# Altium footprint library 7seg.PcbLib: 32 footprints (part 2 of 2)
Each footprint in its own frame and in the unit in brackets; x right, y up, seen from the top. Pads: shape width x height; smd on the part's side, far side on the other; paste and mask are expansions set on the pad; w line width, h text height; cw(c..) or ccw(c..) is an arc to the next point about the centre after c.
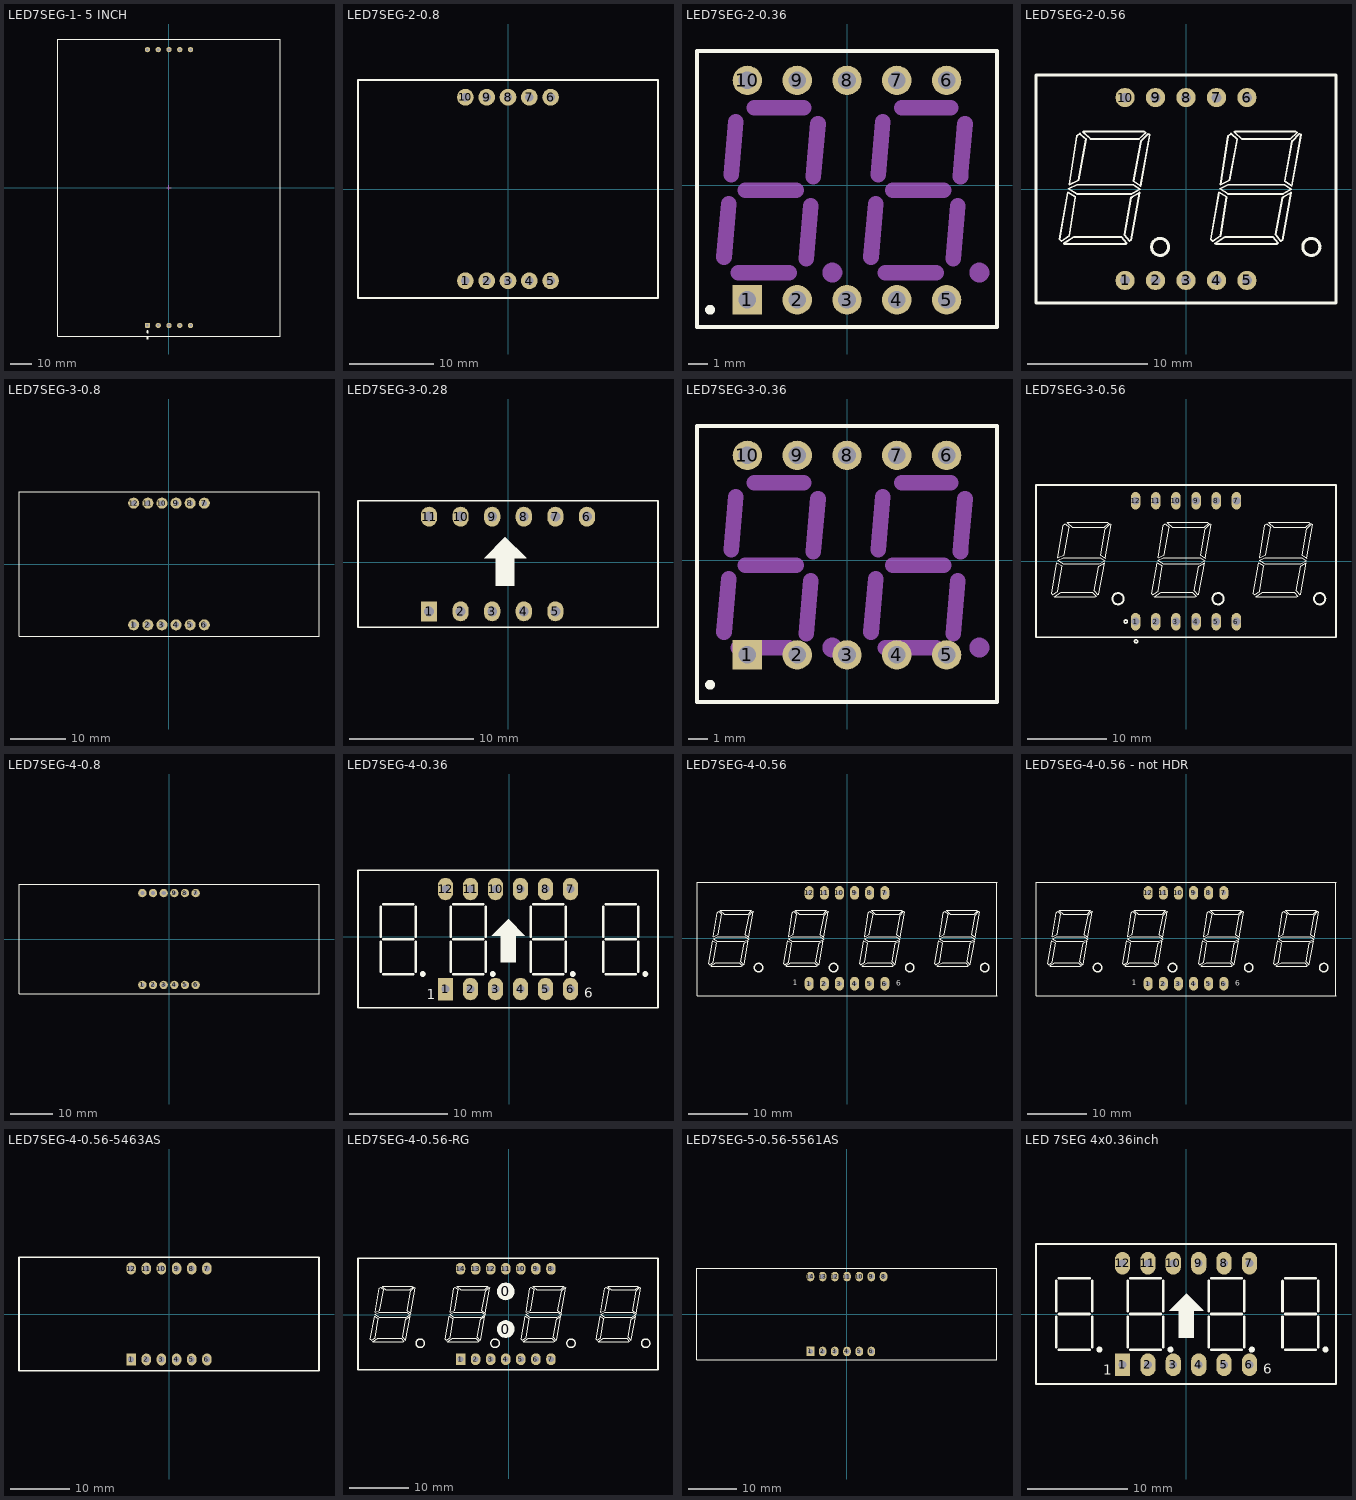
[diagram p1: the footprints below, top view; thin cyan lines are the x and y axes]

## LED7SEG-1- 5 INCH [mm]
pads (10):
  rrect50% 2.5x2.5 hole 1.2: 1(-10.16,-65)
  round 2.5 hole 1.2: 2(-5.08,-65) 3(0,-65) 4(5.08,-65) 5(10.16,-65) 6(10.16,65) 7(5.08,65) 8(0,65) 9(-5.08,65) 10(-10.16,65)
Top Overlay:
  circle w0.2: c-10.1,-68 r0.4
  circle w0.2: c-10.1,-71 r0.4
  lines w0.2: -52.5,-70 52.5,-70 52.5,70 -52.5,70 -52.5,-70
Top Designator:
  text ".Designator" at -3.71,-1.044 h1.52
Mechanical 15:
  lines w0.15: -1,0 1,0 ; 0,-1 0,1
3D body "User Library-7-Segment-5_0inch-50101A-B.STEP": height 16.01, standoff -6.99, extent -52.5,-70 52.5,70

## LED7SEG-2-0.8 [mm]
pads (10):
  round 2 hole 1: 1(-5.08,-10.95) 2(-2.54,-10.95) 3(0,-10.95) 4(2.54,-10.95) 5(5.08,-10.95) 6(5.08,10.95) 7(2.54,10.95) 8(0,10.95) 9(-2.54,10.95) 10(-5.08,10.95)
Top Overlay:
  lines w0.2: -17.9,-13 17.9,-13 17.9,13 -17.9,13 -17.9,-13
3D body "2LED.STEP": height 9, standoff -6.3, extent -17.9,-12.9 17.9,12.9

## LED7SEG-2-0.36 [mm] "LED, 7-Segment Display, 9.2 mm, Dual Digit; 10 Leads; Row Space 10.7 mm; Pitch 2.54 mm"
height 7.35
pads (10):
  rect 1.5x1.5 hole 0.9: 1(-5.08,-5.842)
  round 1.5 hole 0.9: 2(-2.54,-5.842) 3(0,-5.842) 4(2.54,-5.842) 5(5.08,-5.842) 6(5.08,5.35) 7(2.54,5.35) 8(0,5.35) 9(-2.54,5.35) 10(-5.08,5.35)
Top Overlay:
  circle w0.25: c-6.985,-6.35 r0.125
  lines w0.2: -7.65,-7.239 -7.65,-0.635 -7.65,6.858 7.65,6.858 7.65,-7.239 -7.65,-7.239
Mechanical 1:
  circle w0.75: c-0.747,-4.454 r0.13
  circle w0.75: c6.753,-4.454 r0.13
  lines w0.8: -6.275,-3.656 -6.038,-0.949 ; -5.909,0.547 -5.671,3.242 ; -5.541,-4.454 -2.949,-4.454 ; -5.172,-0.254 -2.582,-0.254 ; -4.714,3.946 -2.213,3.946 ; -2.084,-3.75 -1.847,-1.056 ; -1.715,0.448 -1.48,3.145 ; 1.225,-3.656 1.462,-0.949 ; 1.591,0.547 1.829,3.242 ; 1.959,-4.454 4.551,-4.454 ; 2.328,-0.254 4.918,-0.254 ; 2.786,3.946 5.287,3.946 ; 5.416,-3.75 5.653,-1.056 ; 5.785,0.448 6.02,3.145
Top Designator:
  text ".Designator" at -3.71,-0.534 h1.52
3D body "61300511821.stp": height 8.51, standoff -3.09, extent -6.6,4.1 6.6,6.6
3D body "7 Segment Double Digit LED Display.STEP": height 12.02, standoff 1, extent -7.5,-7.264 7.5,6.746
3D body "61300511821.stp": height 8.51, standoff -3.09, extent -6.6,-7.072 6.6,-4.572

## LED7SEG-2-0.56 [mm]
height 0.8
pads (10):
  round 1.6 hole 0.8: 1(-5.08,-7.62) 2(-2.54,-7.62) 3(0,-7.62) 4(2.54,-7.62) 5(5.08,-7.62) 6(5.08,7.62) 7(2.54,7.62) 8(0,7.62) 9(-2.54,7.62) 10(-5.08,7.62)
Top Overlay:
  circle w0.254: c-2.162,-4.826 r0.712
  circle w0.254: c10.443,-4.826 r0.712
  lines w0.152: -9.985,-4.597 -9.452,-4.597 ; -9.376,-4.597 -10.062,-4.597 -10.112,-4.597 ; -8.309,4.801 -3.839,4.801 -3.508,4.801 -3.356,4.699 -3.915,4.166 -4.448,4.166 ; -8.258,4.801 -8.512,4.801 -8.588,4.75 -8.563,4.725 -7.953,4.166 -4.397,4.166 ; 2.619,-4.597 3.153,-4.597 ; 3.229,-4.597 2.543,-4.597 2.492,-4.597 ; 4.296,4.801 8.766,4.801 9.096,4.801 9.249,4.699 8.69,4.166 8.157,4.166 ; 4.347,4.801 4.093,4.801 4.016,4.75 4.042,4.725 4.651,4.166 8.207,4.166 ; -10.366,-4.343 -9.731,-3.911 ; -10.366,-4.343 -10.544,-4.191 -9.858,-0.279 -9.223,-0.66 -9.731,-3.911 ; -10.366,-4.343 -9.731,-3.911 ; -10.112,-4.597 -8.842,-4.597 -5.032,-4.597 -4.931,-4.521 -5.388,-3.987 -9.325,-3.987 -10.189,-4.546 -10.112,-4.597 ; 2.238,-4.343 2.873,-3.911 ; 2.238,-4.343 2.061,-4.191 2.746,-0.279 3.381,-0.66 2.873,-3.911 ; 2.238,-4.343 2.873,-3.911 ; 2.492,-4.597 3.762,-4.597 7.572,-4.597 7.674,-4.521 7.217,-3.987 3.28,-3.987 2.416,-4.546 2.492,-4.597 ; -9.782,0.026 -9.096,0.356 -4.397,0.356 -3.839,-0.025 -4.524,-0.406 -9.096,-0.406 -9.782,0.026 ; -9.731,0.356 -8.969,0.737 -8.334,4.166 -8.842,4.623 -9.096,4.42 -9.731,0.356 ; -5.134,-3.81 -4.575,-0.711 -4.474,-0.66 -3.864,-0.304 -4.575,-4.267 -4.702,-4.343 -5.134,-3.81 ; -4.372,0.661 -3.762,3.988 -3.153,4.598 -3.026,4.547 -3.788,0.254 -4.372,0.661 ; 2.823,0.026 3.508,0.356 8.207,0.356 8.766,-0.025 8.08,-0.406 3.508,-0.406 2.823,0.026 ; 2.873,0.356 3.635,0.737 4.27,4.166 3.762,4.623 3.508,4.42 2.873,0.356 ; 7.471,-3.81 8.03,-0.711 8.131,-0.66 8.741,-0.304 8.03,-4.267 7.903,-4.343 7.471,-3.81 ; 8.233,0.661 8.842,3.988 9.452,4.598 9.579,4.547 8.817,0.254 8.233,0.661
  lines w0.254: -12.5,-9.5 -12.5,9.5 12.5,9.5 12.5,-9.5 -12.5,-9.5
Top Designator:
  text ".Designator" at -7.307,-0.677 h3
3D body "7SEG_2digit_1925.step": height 8.1, standoff -2.9, extent -12.5,-9.5 12.5,9.5

## LED7SEG-3-0.8 [mm]
pads (12):
  round 2 hole 1: 1(-6.35,-10.95) 2(-3.81,-10.95) 3(-1.27,-10.95) 4(1.27,-10.95) 5(3.81,-10.95) 6(6.35,-10.95) 7(6.35,10.95) 8(3.81,10.95) 9(1.27,10.95) 10(-1.27,10.95) 11(-3.81,10.95) 12(-6.35,10.95)
Top Overlay:
  lines w0.2: -27,-13 -27,13 27,13 27,-13 -27,-13
3D body "3LED.STEP": height 9, standoff -6.3, extent -27,-12.9 27,12.9

## LED7SEG-3-0.28 [mil]
height 300
pads (11):
  rect 51.18x62.99 hole 31: 1(-250,-155)
  oval 51.18x62.99 hole 31: 2(-150,-155) 3(-50,-155) 4(50,-155) 5(150,-155) 6(250,145) 7(150,145) 8(50,145) 9(-50,145) 10(-150,145) 11(-250,145)
Top Overlay:
  region: -76,14 -10,80 -8,80 57,15 57,14 20,14 20,-74 -39,-74 -39,14
  lines w5: -475,-205 475,-205 475,195 -475,195 -475,-205
Top Designator:
  text ".Designator" at -146.08,-18.54 h60
3D body "61300611821.stp": height 335.04, standoff -121.65, extent -309.84,95.79 309.85,194.22
3D body "61300511821.stp": height 335.04, standoff -121.65, extent -309.85,-205 209.84,-106.58
3D body "User Library-IND GNT-2831BD.step": height -157.48, standoff -524.02, extent -472.44,-202.25 472.44,191.85

## LED7SEG-3-0.36 [mm]
height 7.35
pads (10):
  rect 1.5x1.5 hole 0.9: 1(-5.08,-4.826)
  round 1.5 hole 0.9: 2(-2.54,-4.826) 3(0,-4.826) 4(2.54,-4.826) 5(5.08,-4.826) 6(5.08,5.35) 7(2.54,5.35) 8(0,5.35) 9(-2.54,5.35) 10(-5.08,5.35)
Top Overlay:
  circle w0.25: c-6.985,-6.35 r0.125
  lines w0.2: -7.65,-7.239 -7.65,-0.635 -7.65,6.858 7.65,6.858 7.65,-7.239 -7.65,-7.239
Mechanical 1:
  circle w0.75: c-0.747,-4.454 r0.13
  circle w0.75: c6.753,-4.454 r0.13
  lines w0.8: -6.275,-3.656 -6.038,-0.949 ; -5.909,0.547 -5.671,3.242 ; -5.541,-4.454 -2.949,-4.454 ; -5.172,-0.254 -2.582,-0.254 ; -4.714,3.946 -2.213,3.946 ; -2.084,-3.75 -1.847,-1.056 ; -1.715,0.448 -1.48,3.145 ; 1.225,-3.656 1.462,-0.949 ; 1.591,0.547 1.829,3.242 ; 1.959,-4.454 4.551,-4.454 ; 2.328,-0.254 4.918,-0.254 ; 2.786,3.946 5.287,3.946 ; 5.416,-3.75 5.653,-1.056 ; 5.785,0.448 6.02,3.145
Top Designator:
  text ".Designator" at -2.44,-0.386 h1.52
3D body "61300511821.stp": height 8.51, standoff -3.09, extent -6.6,4.1 6.6,6.6
3D body "61300511821.stp": height 8.51, standoff -3.09, extent -6.6,-6.076 6.6,-3.576
3D body "SD-3361_X.SLDPRT": height 12, standoff -1.3, extent -9.98,-6.746 12.52,7.254

## LED7SEG-3-0.56 [mm] "7SEG 3DIGIT 0.56"
height 7.62
pads (12):
  oval 1.2x2.2 hole 1: 1(-6.35,-7.62) 2(-3.81,-7.62) 3(-1.27,-7.62) 4(1.27,-7.62) 5(3.81,-7.62) 6(6.35,-7.62) 7(6.35,7.62) 8(3.81,7.62) 9(1.27,7.62) 10(-1.27,7.62) 11(-3.81,7.62) 12(-6.35,7.62)
Top Overlay:
  drawing of 153 lines, arcs and shapes, not listed
Top Designator:
  text ".Designator" at -7.2,-0.634 h3
3D body "end-el-san Co Ltd-King Bright BX56-12A.step": height 8.2, standoff -3.9, extent -18.8,-9.5 18.8,9.5

## LED7SEG-4-0.8 [mm]
pads (12):
  round 2 hole 1: 1(-6.35,-10.95) 2(-3.81,-10.95) 3(-1.27,-10.95) 4(1.27,-10.95) 5(3.81,-10.95) 6(6.35,-10.95) 7(6.35,10.95) 8(3.81,10.95) 9(1.27,10.95) 10(-1.27,10.95) 11(-3.81,10.95) 12(-6.35,10.95)
Top Overlay:
  lines w0.2: -35.75,-13 35.75,-13 35.75,13 -35.75,13 -35.75,-13
3D body "4LED.STEP": height 9, standoff -6.3, extent -35.75,-13 35.75,13

## LED7SEG-4-0.36 [mil]
height 300
pads (12):
  rect 60x90 hole 31: 1(-255,-210)
  oval 60x90 hole 31: 2(-155,-210) 3(-55,-210) 4(45,-210) 5(145,-210) 6(245,-210) 7(245,190) 8(145,190) 9(45,190) 10(-55,190) 11(-155,190) 12(-255,190)
Top Overlay:
  circle w12: c254,-150 r6
  circle w12: c544,-150 r6
  circle w12: c-346,-150 r6
  circle w12: c-66,-150 r6
  region: -71,3 -5,69 -3,69 62,4 62,3 25,3 25,-103 -34,-103 -34,3
  lines w7: -605,-285 -605,265 595,265 595,-285 -605,-285
  lines w10: -515,-140 -515,-20 ; -515,0 -515,120 ; -505,-150 -385,-150 ; -505,130 -385,130 ; -375,-140 -375,-20 ; -375,0 -375,120 ; -235,-140 -235,-20 ; -235,0 -235,120 ; -225,-150 -105,-150 ; -225,130 -105,130 ; -95,-140 -95,-20 ; -95,0 -95,120 ; 85,-140 85,-20 ; 85,0 85,120 ; 95,-150 215,-150 ; 95,130 215,130 ; 225,-140 225,-20 ; 225,0 225,120 ; 375,-140 375,-20 ; 375,0 375,120 ; 385,-150 505,-150 ; 385,130 505,130 ; 515,-140 515,-20 ; 515,0 515,120 ; -505,-10 -385,-10 -505,-10 ; -225,-10 -105,-10 -225,-10 ; 95,-10 215,-10 95,-10 ; 385,-10 505,-10 385,-10
  text "1" at -330,-250 h39.37
  text "6" at 300,-245 h39.37
Top Designator:
  text ".Designator" at -151.08,-24.88 h60
3D body "SOCKET6.stp": height 276.19, standoff -117.33, extent -305,-260 295,-160
3D body "SOCKET6.stp": height 276.19, standoff -117.33, extent -305,140 295,240
3D body "User Library-7-seg-4_asm.STEP": height 7.87, standoff -511.81, extent -595.55,-291.18 585.55,260

## LED7SEG-4-0.56 [mil]
height 300
pads (12):
  oval 60x90 hole 31: 1(-250,-300) 2(-150,-300) 3(-50,-300) 4(50,-300) 5(150,-300) 6(250,-300) 7(250,300) 8(150,300) 9(50,300) 10(-50,300) 11(-150,300) 12(-250,300)
Top Overlay:
  drawing of 200 lines, arcs and shapes, not listed
  text "6" at 325,-326 h60
  text "1" at -358,-324 h60
Top Designator:
  text ".Designator" at -146.08,-18.54 h60
3D body "SOCKET6.stp": height 276.19, standoff -117.33, extent -300,250 300,350
3D body "SOCKET6.stp": height 276.19, standoff -117.33, extent -300,-345 300,-245
3D body "7seg2-4.STEP": height 315.46, standoff -137.3, extent -990.16,-379.02 990.16,369.02

## LED7SEG-4-0.56 - not HDR [mil]
height 300
pads (12):
  oval 60x90 hole 31: 1(-250,-300) 2(-150,-300) 3(-50,-300) 4(50,-300) 5(150,-300) 6(250,-300) 7(250,300) 8(150,300) 9(50,300) 10(-50,300) 11(-150,300) 12(-250,300)
Top Overlay:
  drawing of 200 lines, arcs and shapes, not listed
  text "1" at -358,-324 h60
  text "6" at 325,-326 h60
Top Designator:
  text ".Designator" at -146.08,-18.54 h60
3D body "7seg2-4.STEP": height 315.46, standoff -137.3, extent -990.16,-379.02 990.16,369.02

## LED7SEG-4-0.56-5463AS [mm] "5463AS"
pads (12):
  rect 1.6x2 hole 1: 1(-6.35,-7.62)
  oval 1.6x2 hole 1: 2(-3.81,-7.62) 3(-1.27,-7.62) 4(1.27,-7.62) 5(3.81,-7.62) 6(6.35,-7.62) 7(6.35,7.62) 8(3.81,7.62) 9(1.27,7.62) 10(-1.27,7.62) 11(-3.81,7.62) 12(-6.35,7.62)
Top Overlay:
  lines w0.254: -25.15,-9.5 -25.15,9.5 25.15,9.5 25.15,-9.5 -25.15,-9.5
Top Designator:
  text ".Designator" at -3.837,-0.217 h1.52
3D body "7seg Quad 5643BS.step": height 8, standoff -3, extent -25,-9.5 25,9.5

## LED7SEG-4-0.56-RG [mm]
pads (16):
  round 3 on Top Overlay: 0(-0.508,-2.413) 0(-0.508,3.937)
  rect 1.6x2 hole 1: 1(-8.128,-7.493)
  oval 1.6x2 hole 1: 2(-5.588,-7.493) 3(-3.048,-7.493) 4(-0.508,-7.493) 5(2.032,-7.493) 6(4.572,-7.493) 7(7.112,-7.493) 8(7.112,7.747) 9(4.572,7.747) 10(2.032,7.747) 11(-0.508,7.747) 12(-3.048,7.747) 13(-5.588,7.747) 14(-8.128,7.747)
Top Overlay:
  drawing of 200 lines, arcs and shapes, not listed
Top Designator:
  text ".Designator" at -3.837,-0.217 h1.52
3D body "SOCKET6.stp": height 7.02, standoff -2.98, extent -8.255,-8.509 6.985,-5.969
3D body "SOCKET6.stp": height 7.02, standoff -2.98, extent -8.255,6.604 6.985,9.144
3D body "7seg2-4.STEP": height 14.35, standoff 2.85, extent -25.277,-9.398 25.023,9.602

## LED7SEG-5-0.56-5561AS [mm] "5561AS"
pads (13):
  rect 1.6x2 hole 1: 1(-7.62,-7.8)
  oval 1.6x2 hole 1: 2(-5.08,-7.8) 3(-2.54,-7.8) 4(0,-7.8) 5(2.54,-7.8) 6(5.08,-7.8) 8(7.62,7.8) 9(5.08,7.8) 10(2.54,7.8) 11(0,7.8) 12(-2.54,7.8) 13(-5.08,7.8) 14(-7.62,7.8)
Top Overlay:
  lines w0.254: -31.25,-9.5 -31.25,9.5 31.25,9.5 31.25,-9.5 -31.25,-9.5
Top Designator:
  text ".Designator" at -3.837,-0.217 h1.52
3D body "7seg_056_5.STEP": height 8.1, standoff -5.64, extent -31.25,-9.5 31.25,9.5

## LED 7SEG 4x0.36inch [mil] "3641BS - 0.36-inch Red 4-Digit CA LED 7-Segment Display"
pads (12):
  rect 60x90 hole 31: 1(-250,-200)
  oval 60x90 hole 31: 2(-150,-200) 3(-50,-200) 4(50,-200) 5(150,-200) 6(250,-200) 7(250,200) 8(150,200) 9(50,200) 10(-50,200) 11(-150,200) 12(-250,200)
Top Overlay:
  circle w12: c259,-140 r6
  circle w12: c549,-140 r6
  circle w12: c-341,-140 r6
  circle w12: c-61,-140 r6
  region: -66,13 0,79 2,79 67,14 67,13 30,13 30,-93 -29,-93 -29,13
  lines w7: -590.55,-275.59 590.55,-275.59 590.55,275.59 -590.55,275.59 -590.55,-275.59
  lines w10: -510,-130 -510,-10 ; -510,10 -510,130 ; -500,-140 -380,-140 ; -500,140 -380,140 ; -370,-130 -370,-10 ; -370,10 -370,130 ; -230,-130 -230,-10 ; -230,10 -230,130 ; -220,-140 -100,-140 ; -220,140 -100,140 ; -90,-130 -90,-10 ; -90,10 -90,130 ; 90,-130 90,-10 ; 90,10 90,130 ; 100,-140 220,-140 ; 100,140 220,140 ; 230,-130 230,-10 ; 230,10 230,130 ; 380,-130 380,-10 ; 380,10 380,130 ; 390,-140 510,-140 ; 390,140 510,140 ; 520,-130 520,-10 ; 520,10 520,130 ; -500,0 -380,0 -500,0 ; -220,0 -100,0 -220,0 ; 100,0 220,0 100,0 ; 390,0 510,0 390,0
  text "1" at -325,-240 h39.37
  text "6" at 305,-235 h39.37
Top Designator:
  text ".Designator" at -146.08,-13.54 h60
3D body "User Library-7-seg-4_asm.STEP": height 218.5, standoff -301.18, extent -590.55,-275.59 590.55,275.59